# Altium footprint library Clema_RES.PcbLib: 2 footprints
Each footprint in its own frame and in the unit in brackets; x right, y up, seen from the top. Pads: shape width x height; smd on the part's side, far side on the other; paste and mask are expansions set on the pad; w line width, h text height; cw(c..) or ccw(c..) is an arc to the next point about the centre after c.
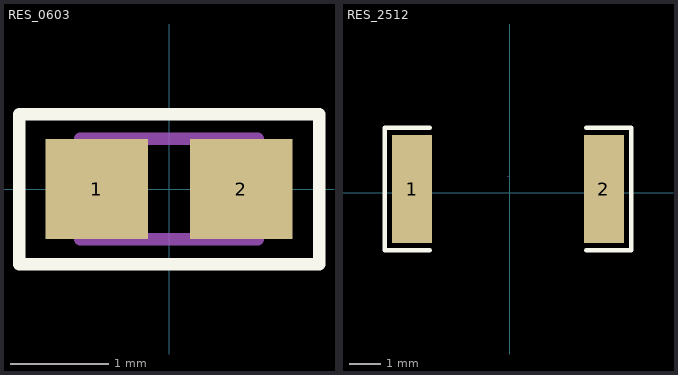
[diagram p0: the footprints below, top view; thin cyan lines are the x and y axes]

## RES_0603 [mm]
pads (2):
  rect 1.04x1.02 smd: 1(-0.735,0) 2(0.735,0)
Top Overlay:
  lines w0.127: -1.524,-0.762 -1.524,0.762 1.524,0.762 1.524,-0.762 -1.524,-0.762
Mechanical 13:
  lines w0.127: -0.9,-0.51 0.9,-0.51 0.9,0.51 -0.9,0.51 -0.9,-0.51
Mechanical 15:
  lines w0.05: -1.508,-0.761 1.508,-0.761 1.508,0.761 -1.508,0.761 -1.508,-0.761
3D body "step_temp.STEP": height 0.55, standoff 0, extent -0.8,-0.4 0.8,0.4

## RES_2512 [mm]
pads (2):
  rect 1.283x3.456 smd paste-100 mask+0.051: 1(-3.118,0.128) 2(3.015,0.128)
Top Overlay:
  lines w0.152: -2.553,-1.829 -3.988,-1.829 -3.988,2.084 -2.553,2.084 ; 2.45,-1.829 3.884,-1.829 3.884,2.084 2.45,2.084
Top Paste:
  region: -2.477,-1.5 -2.477,-0.56 -2.577,-0.46 -2.813,-0.46 -2.913,-0.36 -2.913,0.615 -2.813,0.715 -2.577,0.715 -2.477,0.815 -2.477,1.756 -2.577,1.856 -3.659,1.856 -3.759,1.756 -3.759,-1.5 -3.659,-1.6 -2.577,-1.6
  region: 2.373,-1.5 2.373,-0.56 2.473,-0.46 2.709,-0.46 2.809,-0.36 2.809,0.615 2.709,0.715 2.473,0.715 2.373,0.815 2.373,1.756 2.473,1.856 3.556,1.856 3.656,1.756 3.656,-1.5 3.556,-1.6 2.473,-1.6
Mechanical 15:
  lines w0.003: -0.052,0.54 -0.051,0.54